# Altium footprint library FTP.PcbLib: 207 footprints (part 7 of 13)
Each footprint in its own frame and in the unit in brackets; x right, y up, seen from the top. Pads: shape width x height; smd on the part's side, far side on the other; paste and mask are expansions set on the pad; w line width, h text height; cw(c..) or ccw(c..) is an arc to the next point about the centre after c.
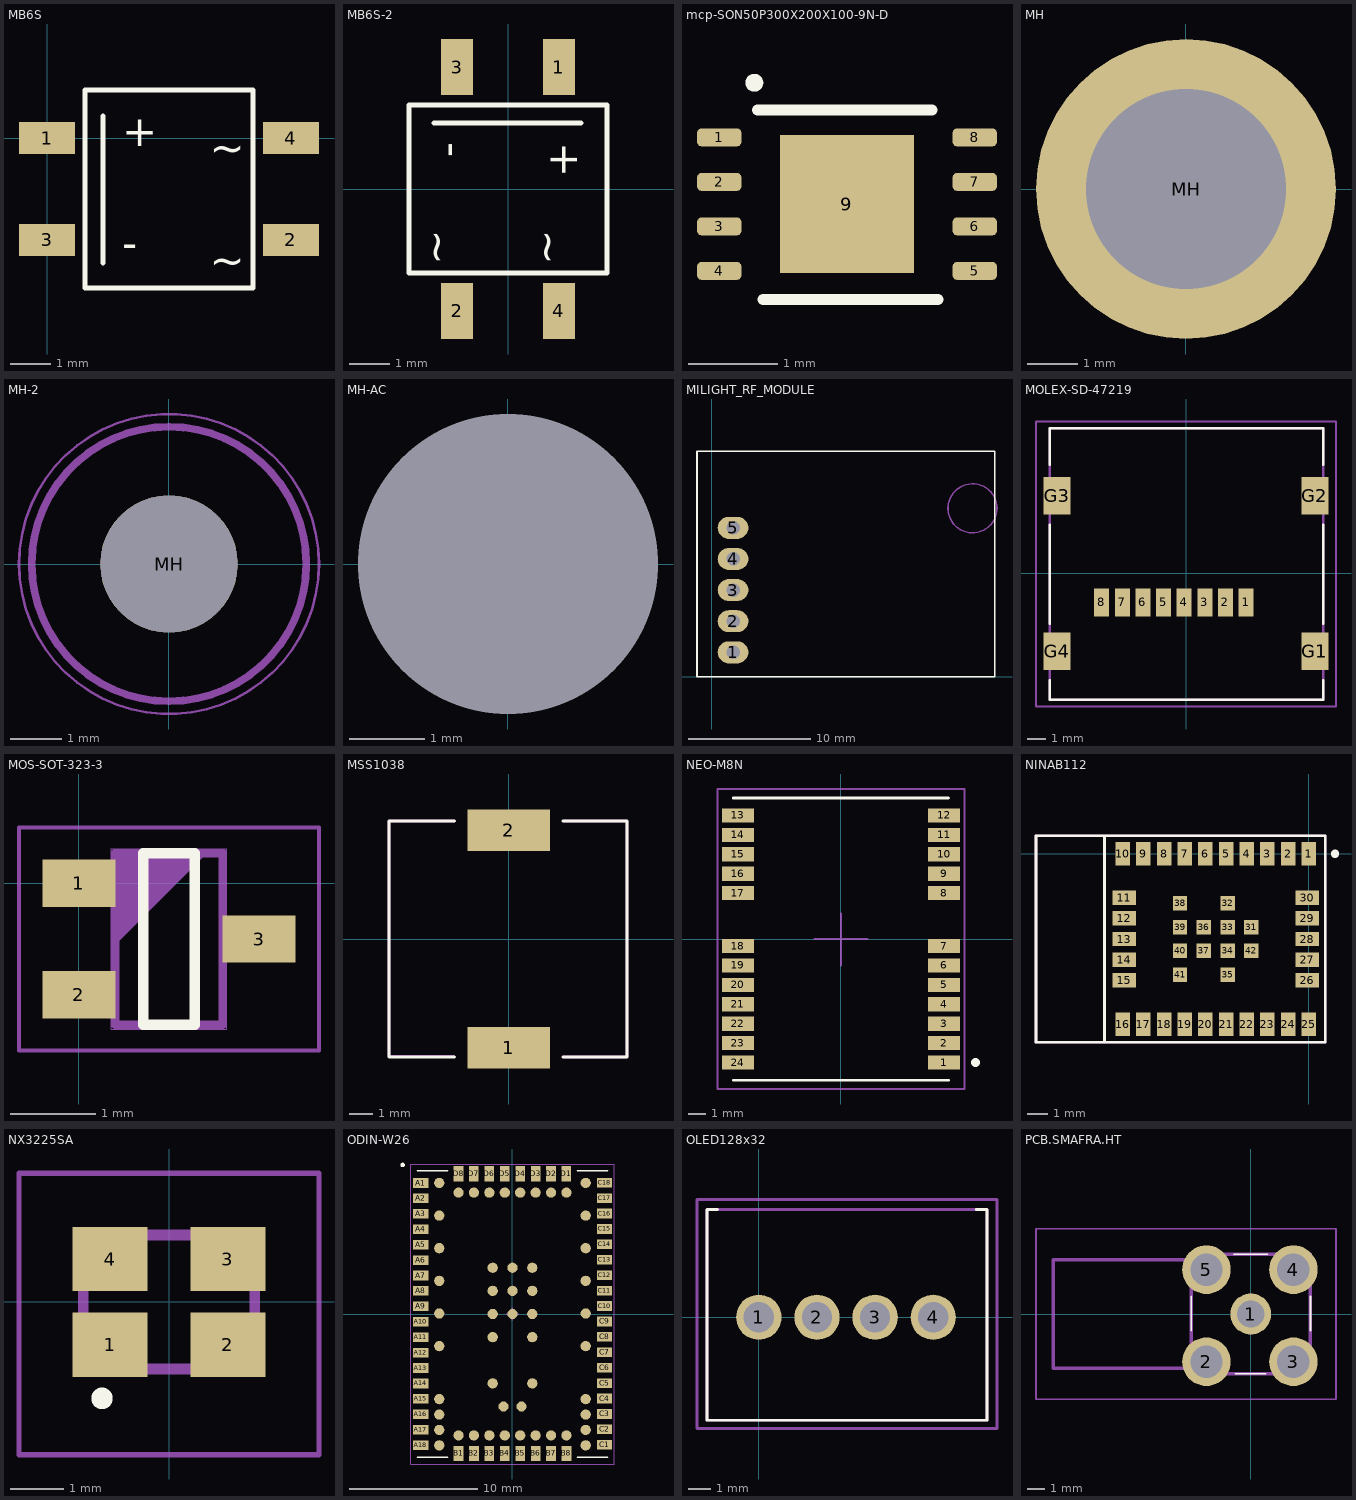
[diagram p6: the footprints below, top view; thin cyan lines are the x and y axes]

## MB6S [mm]
pads (4):
  rect 1.4x0.8 smd mask+0: 1(0,0) 2(6.1,-2.54) 3(0,-2.54) 4(6.1,0)
Top Overlay:
  lines w0.127: 1.399,-3.124 1.399,0.559 ; 0.95,-3.745 5.15,-3.745 5.15,1.205 0.95,1.205 0.95,-3.745
  text "~" at 4.066,-3.429 h0.76
  text "~" at 4.066,-0.61 h0.76
  text "-" at 1.882,-2.997 h0.76
  text "+" at 1.882,-0.203 h0.76
3D body "User Library-TO-269AA_jam.step": height 2.7, standoff 0, extent -0.47,-3.745 6.57,1.205

## MB6S-2 [mm]
pads (4):
  rect 0.8x1.4 smd mask+0: 1(1.27,3.05) 2(-1.27,-3.05) 3(-1.27,3.05) 4(1.27,-3.05)
Top Overlay:
  lines w0.127: -1.854,1.651 1.829,1.651 ; -2.475,-2.1 -2.475,2.1 2.475,2.1 2.475,-2.1 -2.475,-2.1
  text "+" at 1.067,1.168 h0.76
  text "-" at -1.727,1.168 h0.76
  text "~" at 0.66,-1.016 h0.76
  text "~" at -2.108,-1.016 h0.76
3D body "User Library-TO-269AA_jam.step": height 2.7, standoff 0, extent -2.475,-3.52 2.475,3.52

## mcp-SON50P300X200X100-9N-D [mm]
pads (9):
  rrect50% 0.5x0.2 smd: 1(-4.116,3.221) 2(-4.116,2.721) 3(-4.116,2.221) 4(-4.116,1.721) 5(-1.246,1.721) 6(-1.246,2.221) 7(-1.246,2.721) 8(-1.246,3.221)
  rect 1.5x1.55 smd: 9(-2.681,2.471)
Top Overlay:
  circle w0.1: c-3.722,3.835 r0.05
  lines w0.125: -3.689,3.531 -1.727,3.531 ; -3.624,1.399 -1.662,1.399
Top Paste:
  region: -2.606,2.961 -2.016,2.961 -2.016,1.981 -2.606,1.981
  region: -3.346,2.961 -2.756,2.961 -2.756,1.981 -3.346,1.981
3D body "MCP73831-2ACI_MC.stp": height 1, standoff 0, extent -4.231,1.471 -1.131,3.471

## MH [mm]
pads (1):
  round 6 hole 4 mask+0.1: MH(0,0)

## MH-2 [mm]
pads (1):
  round 2.7 hole 2.7 paste-2539.97 mask+1.7: MH(0,0)
Courtyard Top:
  circle w0.05: c0,0 r2.95
3D Body Bottom:
  circle w0.15: c0,0 r2.7

## MH-AC [mm]
pads (1):
  round 0 hole 4 unplated mask+0.1: MH(0,0)

## MILIGHT_RF_MODULE [mm]
pads (5):
  oval 2.5x1.8 hole 1.1: 1(1.74,2) 2(1.74,4.54) 3(1.74,7.08) 4(1.74,9.62) 5(1.74,12.16)
Top Overlay:
  lines w0.127: -1.2,0 23.114,0 23.114,18.415 -1.2,18.415 -1.2,0
Mechanical 13:
  circle w0.127: c21.28,13.75 r2
3D body "Milight_Rf.step": height 7.55, standoff 2.61, extent -1.12,0 23.114,18.415
3D body "61300511121_Download_STP_61300511121_rev1.stp": height 5.54, standoff -6, extent 0.47,0.762 3.01,13.462

## MOLEX-SD-47219 [mm]
pads (12):
  rect 0.8x1.5 smd paste-0.1 mask+0.07: 1(3.205,-1.55) 2(2.105,-1.55) 3(1.005,-1.55) 4(-0.095,-1.55) 5(-1.195,-1.55) 6(-2.295,-1.55) 7(-3.395,-1.55) 8(-4.495,-1.55)
  rect 1.45x2 smd paste-0.1 mask+0.07: G1(6.875,-4.15) G2(6.875,4.15) G3(-6.875,4.15) G4(-6.875,-4.15)
Top Overlay:
  lines w0.127: -7.275,-5.7 -7.275,-6.75 7.325,-6.75 7.325,-5.7 ; -7.275,-2.7 -7.275,2.6 ; -7.275,5.8 -7.275,7.75 7.325,7.75 7.325,5.8 ; 7.325,-2.7 7.325,2.6
  text "." at 3.3,-7.7 h0.76
Mechanical 13:
  lines w0.127: -7.275,-6.75 7.325,-6.75 7.325,7.75 -7.275,7.75 -7.275,-6.75
Mechanical 15:
  lines w0.127: -8,-7.1 -8,8.1 8,8.1 8,-7.1 -8,-7.1
  text "+" at 0.5,0.7 h1.5
3D body "472192001.stp": height 2.06, standoff 0.17, extent -7.275,-6.75 7.325,7.75

## MOS-SOT-323-3 [mm]
height 1.1
pads (3):
  rect 0.85x0.55 smd: 1(0,0) 2(0,-1.3) 3(2.1,-0.65)
Top Overlay:
  lines w0.127: 0.75,-1.65 0.75,0.35 1.35,0.35 1.35,-1.65 0.75,-1.65
Mechanical 15:
  lines w0.05: -0.7,-1.95 -0.7,0.65 2.8,0.65 2.8,-1.95 -0.7,-1.95
  lines w0.1: 0.425,-0.65 1.425,0.35 ; 0.425,-0.55 1.325,0.35 ; 0.425,-0.45 1.225,0.35 ; 0.425,-0.35 1.125,0.35 ; 0.425,-0.25 1.025,0.35 ; 0.425,-0.15 0.925,0.35 ; 0.425,-0.05 0.825,0.35 ; 0.425,0.05 0.725,0.35 ; 0.425,0.15 0.625,0.35 ; 0.425,0.25 0.525,0.35 ; 0.425,-1.65 0.425,0.35 1.675,0.35 1.675,-1.65 0.425,-1.65
Mechanical 21:
  lines w0.001: 0.375,-1.7 0.375,0.4 1.725,0.4 1.725,-1.7 0.375,-1.7
3D body "SI1304BDL-T1-E3.stp": height 1.1, standoff 0, extent -0.127,-1.65 1.973,0.35

## MSS1038 [mm]
pads (2):
  rect 3.56x1.78 smd mask+0.07: 1(0,-4.7) 2(0,4.7)
Top Overlay:
  lines w0.127: -2.342,-5.1 -5.175,-5.1 -5.175,5.1 -2.342,5.1 ; 2.342,-5.1 5.1,-5.1 5.1,5.1 2.342,5.1
Mechanical 15:
  lines w0.127: -2.368,-5.075 -5.175,-5.075 -5.175,5.1 -2.342,5.1 ; 2.342,-5.1 5.1,-5.1 5.1,5.1 2.342,5.1
3D body "Coilcraft-MSS1038T.step": height 4, standoff 0, extent -5.1,-5.15 5.1,5.15

## NEO-M8N [mm]
pads (24):
  rect 1.8x0.8 smd paste-0.1: 1(5.842,-7) 2(5.842,-5.9) 3(5.842,-4.8) 4(5.842,-3.7) 5(5.842,-2.6) 6(5.842,-1.5) 7(5.842,-0.4) 8(5.842,2.6) 9(5.842,3.7) 10(5.842,4.8) 11(5.842,5.9) 12(5.842,7) 13(-5.842,7) 14(-5.842,5.9) 15(-5.842,4.8) 16(-5.842,3.7) 17(-5.842,2.6) 18(-5.842,-0.4) 19(-5.842,-1.5) 20(-5.842,-2.6) 21(-5.842,-3.7) 22(-5.842,-4.8) 23(-5.842,-5.9) 24(-5.842,-7)
Top Overlay:
  circle w0.38: c7.625,-7 r0.058
  lines w0.16: -6.109,-8 6.096,-8 ; -6.109,7.996 6.09,7.996
Top Paste:
  rectangle: 5.642,-7.4 6.842,-6.6
  rectangle: 5.642,-6.3 6.842,-5.5
  rectangle: 5.642,-5.2 6.842,-4.4
  rectangle: 5.642,-4.1 6.842,-3.3
  rectangle: 5.642,-3 6.842,-2.2
  rectangle: 5.642,-1.9 6.842,-1.1
  rectangle: 5.642,-0.8 6.842,0
  rectangle: 5.642,2.2 6.842,3
  rectangle: 5.642,3.3 6.842,4.1
  rectangle: 5.642,4.4 6.842,5.2
  rectangle: 5.642,5.5 6.842,6.3
  rectangle: 5.642,6.6 6.842,7.4
  rectangle: -6.833,6.6 -5.633,7.4
  rectangle: -6.833,5.5 -5.633,6.3
  rectangle: -6.833,4.4 -5.633,5.2
  rectangle: -6.833,3.3 -5.633,4.1
  rectangle: -6.833,2.2 -5.633,3
  rectangle: -6.833,-0.8 -5.633,0
  rectangle: -6.833,-1.9 -5.633,-1.1
  rectangle: -6.833,-3 -5.633,-2.2
  rectangle: -6.833,-5.2 -5.633,-4.4
  rectangle: -6.833,-6.3 -5.633,-5.5
  rectangle: -6.833,-7.4 -5.633,-6.6
  rectangle: -6.833,-4.1 -5.633,-3.3
Mechanical 15:
  lines w0.1: -1.499,0 0,0 ; 0,-1.519 0,0 ; 0,1.445 0,0 ; 1.501,0 0,0 ; -7,-8.5 7,-8.5 7,8.5 -7,8.5 -7,-8.5
3D body "NEO (STEP-AP214)_B.STEP": height 2.28, standoff -0.05, extent -6.104,-8 6.096,8

## NINAB112 [mm]
pads (42):
  rect 0.7x1.15 smd: 1(0,0) 2(-1,0) 3(-2,0) 4(-3,0) 5(-4,0) 6(-5,0) 7(-6,0) 8(-7,0) 9(-8,0) 10(-9,0) 16(-9,-8.25) 17(-8,-8.25) 18(-7,-8.25) 19(-6,-8.25) 20(-5,-8.25) 21(-4,-8.25) 22(-3,-8.25) 23(-2,-8.25) 24(-1,-8.25) 25(0,-8.25)
  rect 1.15x0.7 smd: 11(-8.925,-2.125) 12(-8.925,-3.125) 13(-8.925,-4.125) 14(-8.925,-5.125) 15(-8.925,-6.125) 26(-0.075,-6.125) 27(-0.075,-5.125) 28(-0.075,-4.125) 29(-0.075,-3.125) 30(-0.075,-2.125)
  rect 0.7x0.7 smd: 31(-2.78,-3.55) 32(-3.93,-2.4) 33(-3.93,-3.55) 34(-3.93,-4.7) 35(-3.93,-5.85) 36(-5.08,-3.55) 37(-5.08,-4.7) 38(-6.23,-2.4) 39(-6.23,-3.55) 40(-6.23,-4.7) 41(-6.23,-5.85) 42(-2.78,-4.7)
Top Overlay:
  circle w0.3: c1.27,0 r0.05
  lines w0.127: -9.883,-9.125 -9.883,0.875 ; -13.2,-9.125 0.8,-9.125 0.8,0.875 -13.2,0.875 -13.2,-9.125
Courtyard Top:
  lines w0.127: -13.198,-9.125 -13.198,0.875 -9.398,0.875 0.802,0.875 0.802,-9.125 -9.398,-9.125 -13.198,-9.125
3D body "NINA-B112.stp": height 3.76, standoff -0.02, extent -13.2,-9.125 0.8,0.875

## NX3225SA [mm]
pads (4):
  rect 1.4x1.2 smd: 1(-1.1,-0.8) 2(1.1,-0.8) 3(1.1,0.8) 4(-1.1,0.8)
Top Overlay:
  lines w0.3: -1.3,-1.8 ccw(c-1.25,-1.8) -1.2,-1.8 ccw(c-1.25,-1.8) -1.3,-1.8
Mechanical 15:
  lines w0.2: -1.6,-1.25 -1.6,1.25 1.6,1.25 1.6,-1.25 -1.6,-1.25
Mechanical 20:
  lines w0.1: -2.8,-2.85 -2.8,2.4 2.8,2.4 2.8,-2.85 -2.8,-2.85
3D body "NX3225SA-12MHZ-STD-CSR-6.stp": height 0.7, standoff 0, extent -1.6,-1.25 1.6,1.25

## ODIN-W26 [mm] "ODIN-W262 WiFi/BT  module"
pads (103):
  rect 1.19x0.75 smd mask+0.05: A1(-7.147,10.196) A2(-7.147,8.996) A3(-7.147,7.796) A4(-7.147,6.596) A5(-7.147,5.396) A6(-7.147,4.196) A7(-7.147,2.996) A8(-7.147,1.796) A9(-7.147,0.596) A10(-7.147,-0.604) A11(-7.147,-1.804) A12(-7.147,-3.004) A13(-7.147,-4.204) A14(-7.147,-5.404) A15(-7.147,-6.604) A16(-7.147,-7.804) A17(-7.147,-9.004) A18(-7.147,-10.204) C1(7.165,-10.18) C2(7.165,-8.98) C3(7.165,-7.78) C4(7.165,-6.58) C5(7.165,-5.38) C6(7.165,-4.18) C7(7.165,-2.98) C8(7.165,-1.78) C9(7.165,-0.58) C10(7.165,0.62) C11(7.165,1.82) C12(7.165,3.02) C13(7.165,4.22) C14(7.165,5.42) C15(7.165,6.62) C16(7.165,7.82) C17(7.165,9.02) C18(7.165,10.22)
  rect 0.75x1.19 smd mask+0.05: B1(-4.2,-10.85) B2(-3,-10.85) B3(-1.8,-10.85) B4(-0.6,-10.85) B5(0.6,-10.85) B6(1.8,-10.85) B7(3,-10.85) B8(4.2,-10.85) D1(4.198,10.919) D2(2.998,10.919) D3(1.798,10.919) D4(0.598,10.919) D5(-0.602,10.919) D6(-1.802,10.919) D7(-3.002,10.919) D8(-4.202,10.919)
  round 0.8 smd mask+0.05: GND(-5.7,-10.225) GND(-5.7,-9.025) GND(-5.7,-7.825) GND(-5.7,-6.625) GND(-4.2,-9.45) GND(-4.2,9.45) GND(-3,-9.45) GND(-3,9.45) GND(-1.8,-9.45) GND(-1.8,9.45) GND(-1.54,-5.4) GND(-1.54,-1.8) GND(-1.54,0) GND(-1.54,1.8) GND(-1.54,3.6) GND(-0.7,-7.2) GND(-0.6,-9.45) GND(-0.6,9.45) GND(0,0) GND(0,1.8) GND(0,3.6) GND(0.6,-9.45) GND(0.6,9.45) GND(0.7,-7.2) GND(1.54,-5.4) GND(1.54,-1.8) GND(1.54,0) GND(1.54,1.8) GND(1.54,3.6) GND(1.8,-9.45) GND(1.8,9.45) GND(3,-9.45) GND(3,9.45) GND(4.2,-9.45) GND(4.2,9.45) GND(5.7,-10.225) GND(5.7,-9.025) GND(5.7,-7.825) GND(5.7,-6.625) TP1(-5.7,-2.5) TP2(5.7,-2.5) TP3(-5.7,0.04) TP4(5.7,0.04) TP5(-5.7,2.58) TP6(5.7,2.58) TP7(-5.7,5.12) TP8(5.7,5.12) TP9(-5.7,7.66) TP10(5.7,7.66) TP11(-5.7,10.2) TP12(5.7,10.2)
Top Overlay:
  lines w0.15: -7.4,11.15 -7.4,11.15 -5.05,11.15 ; -5.05,-11.15 -7.4,-11.15 ; 5.05,-11.15 7.4,-11.15 ; 5.05,11.15 7.4,11.15 7.4,11.15 ; -7.4,-11.15 -7.4,-11.15 ; 7.4,-11.15 7.4,-11.15
  lines w0.2: -8.48,11.621 ccw(c-8.55,11.6) -8.477,11.593
Mechanical 15:
  lines w0.05: -7.925,-11.675 7.925,-11.675 7.925,11.675 -7.925,11.675 -7.925,-11.675
  lines w0.1: -0.5,0 0,0 0.5,0 ; 0,-0.5 0,0.5
3D body "ODIN-W262 Module.stp": height 4.47, standoff -0.02, extent -7.4,-11.15 7.4,11.15

## OLED128x32 [mm]
pads (4):
  round 1.98 hole 1.32: 1(0,0) 2(2.54,0) 3(5.08,0) 4(7.62,0)
Top Overlay:
  lines w0.127: -1.8,4.7 -2.258,4.7 -2.258,-4.5 9.962,-4.5 9.962,4.7 9.5,4.7
  text "." at -3.5,1.5 h0.76
Mechanical 13:
  lines w0.127: -2.258,-4.5 9.962,-4.5 9.962,4.7 -2.258,4.7 -2.258,-4.5
Mechanical 15:
  lines w0.127: -2.7,-4.857 10.405,-4.857 10.405,5.143 -2.7,5.143 -2.7,-4.857
3D body "CES-104-02-S-S.stp": height 5.08, standoff -5.66, extent -1.08,-1.464 9.08,1.584

## PCB.SMAFRA.HT [mm]
pads (5):
  round 2.4 hole 1.6: 1(0,0)
  round 2.85 hole 1.9: 2(-2.6,-2.8) 3(2.5,-2.8) 4(2.5,2.6) 5(-2.6,2.6)
Top Overlay:
  lines w0.1: -3.5,-0.975 -3.5,1.025 ; -1,3.5 1,3.5 ; -0.896,-3.5 0.872,-3.5 ; 3.5,-0.975 3.5,1.025
Bottom Overlay:
  circle w0.2: c1.925,0.225 r0.1
Mechanical 13:
  lines w0.2: -3.5,-3.175 -11.6,-3.175 -11.6,3.175 -3.5,3.175 ; -3.5,-3.5 -3.5,3.5 3.5,3.5 3.5,-3.5 -3.5,-3.5
Mechanical 15:
  lines w0.1: -12.6,-5 -12.6,5 5,5 5,-5 -12.6,-5
3D body "PCB.SMAFRA.HT_Web.STEP": height 8.42, standoff -5.35, extent -11.484,-3.543 3.616,3.457